# Altium footprint library TitansLib.PcbLib: 333 footprints (part 9 of 21)
Each footprint in its own frame and in the unit in brackets; x right, y up, seen from the top. Pads: shape width x height; smd on the part's side, far side on the other; paste and mask are expansions set on the pad; w line width, h text height; cw(c..) or ccw(c..) is an arc to the next point about the centre after c.
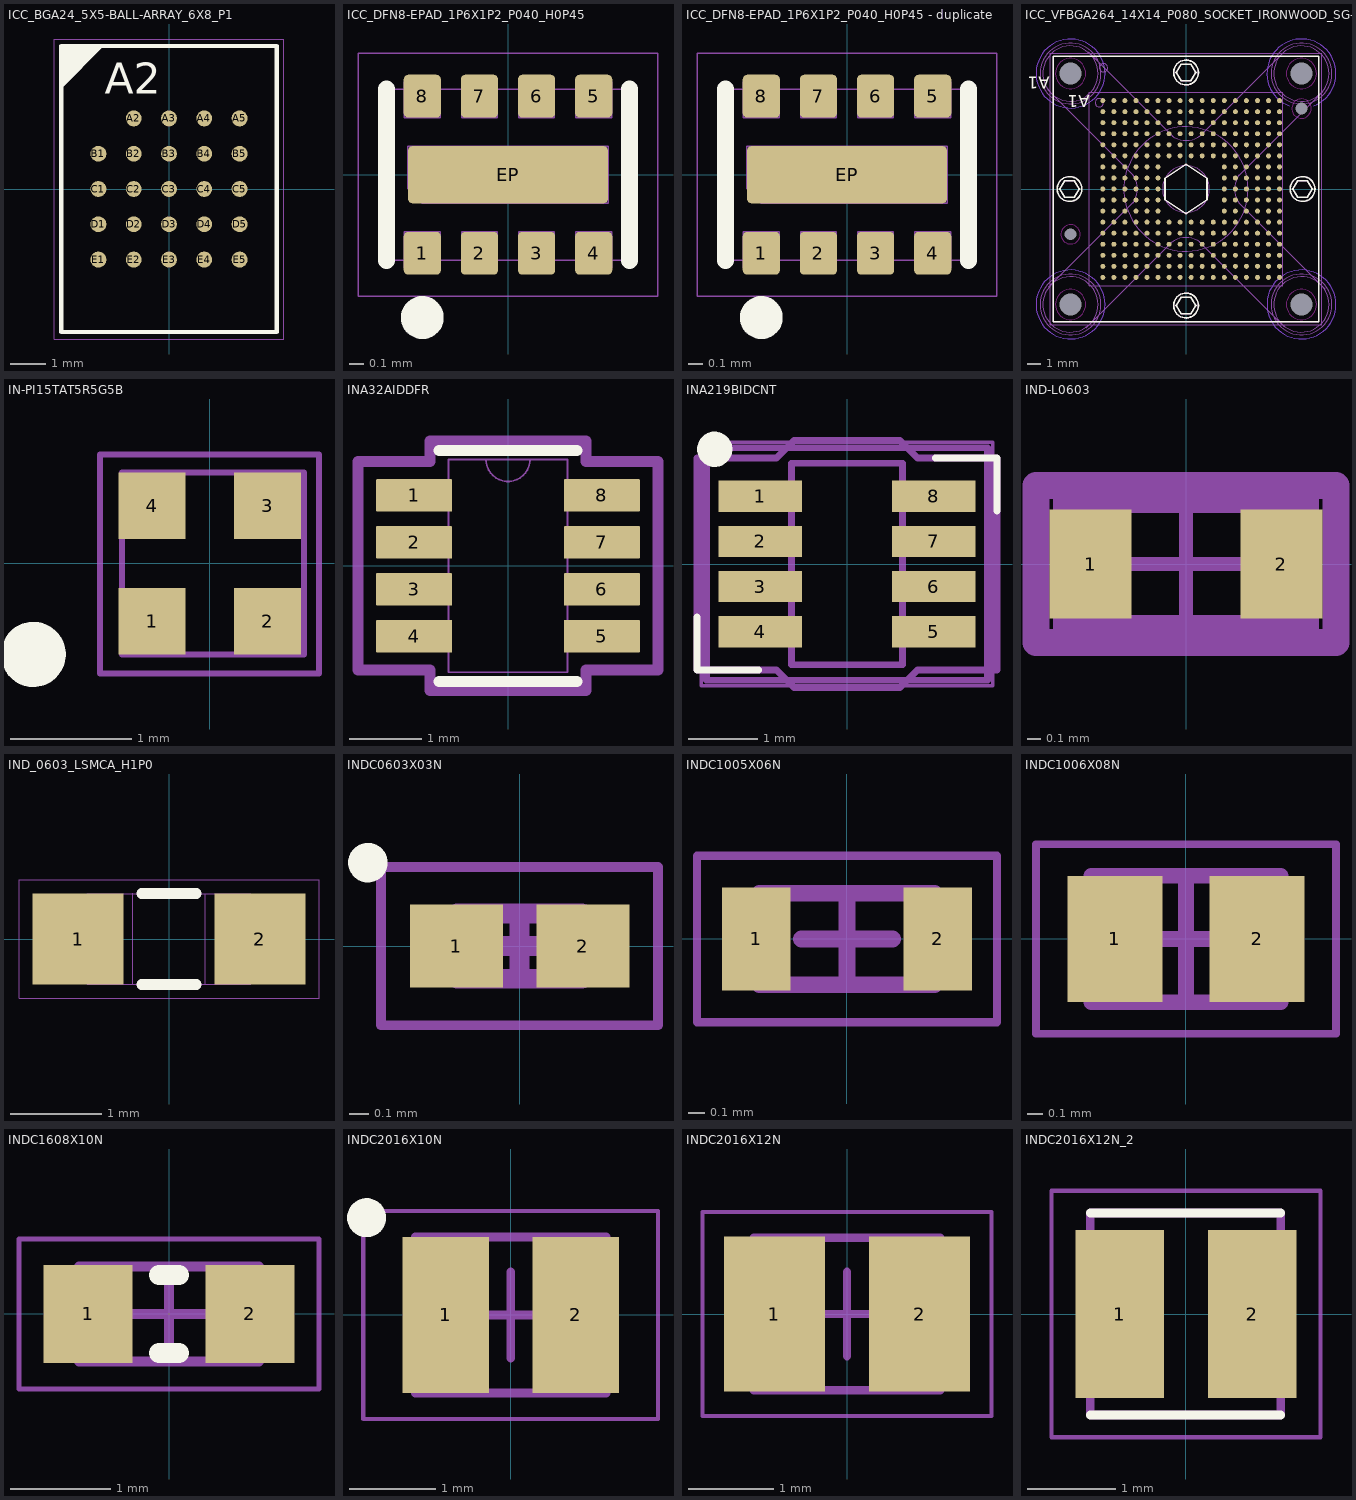
[diagram p8: the footprints below, top view; thin cyan lines are the x and y axes]

## ICC_BGA24_5X5-BALL-ARRAY_6X8_P1 [mm]
height 1.2
pads (24):
  round 0.45 smd mask+0.05: A2(-1,2) A3(0,2) A4(1,2) A5(2,2) B1(-2,1) B2(-1,1) B3(0,1) B4(1,1) B5(2,1) C1(-2,0) C2(-1,0) C3(0,0) C4(1,0) C5(2,0) D1(-2,-1) D2(-1,-1) D3(0,-1) D4(1,-1) D5(2,-1) E1(-2,-2) E2(-1,-2) E3(0,-2) E4(1,-2) E5(2,-2)
Top Overlay:
  lines w0.12: -3.05,2.925 -1.925,4.05 ; -3.05,3.025 -2.025,4.05 ; -3.05,3.175 -2.175,4.05 ; -3.05,3.325 -2.325,4.05 ; -3.05,3.475 -2.475,4.05 ; -3.05,3.625 -2.625,4.05 ; -3.05,3.775 -2.775,4.05 ; -3.05,3.9 -2.9,4.05 ; -3.05,-4.05 3.05,-4.05 3.05,4.05 -3.05,4.05 -3.05,-4.05
  text "A2" at -1.825,2.4 h1.5
Top 3D Body:
  lines w0.01: -3.25,-4.25 -3.25,4.25 3.25,4.25 3.25,-4.25 -3.25,-4.25
Top Assembly:
  text "E1" at -3.01,-2.201 h0.75
  text "D1" at -2.984,-1.235 h0.75
  text "C1" at -3.01,-0.194 h0.75
  text "B1" at -3.035,0.72 h0.75
  text "A5" at 1.74,2.575 h0.75
  text "A4" at 0.699,2.575 h0.75
  text "A3" at -0.317,2.6 h0.75
  text "A2" at -1.232,2.625 h0.75
Bottom 3D Body:
  lines w0.01: -3.05,2.925 -1.925,4.05 -3.037,2.937 ; -3.05,-4.05 -3.05,4.05 3.05,4.05 3.05,-4.05 -3.05,-4.05
3D body "ICC_BGA24_5X5-BALL-ARRAY_6X8_P1.STEP": height 0.96, standoff -0.04, extent -3,-4 3,4
3D body: height 1.2, standoff 0, extent -3.055,-4.055 3.055,4.055

## ICC_DFN8-EPAD_1P6X1P2_P040_H0P45 [mm] "MCD-02937"
height 0.5
pads (9):
  rrect23% 0.26x0.3 smd mask+0.038: 1(-0.6,-0.55) 2(-0.2,-0.55) 3(0.2,-0.55) 4(0.6,-0.55) 5(0.6,0.55) 6(0.2,0.55) 7(-0.2,0.55) 8(-0.6,0.55)
  rrect15% 1.4x0.4 smd mask+0.038: EP(0,0)
Top Overlay:
  circle w0.2: c-0.6,-1 r0.05
  lines w0.12: -0.85,-0.6 -0.85,0.6 ; 0.85,-0.6 0.85,0.6
Top Courtyard:
  lines w0.01: -1.05,-0.85 -1.05,0.85 1.05,0.85 1.05,-0.85 -1.05,-0.85
Bottom 3D Body:
  lines w0.01: -0.7,-0.1 -0.7,0.2 0.7,0.2 0.7,-0.2 -0.6,-0.2 -0.7,-0.1 ; -0.7,-0.1 -0.7,-0.1 ; -0.8,-0.6 0.8,-0.6 0.8,0.6 -0.8,0.6 -0.8,-0.6 ; -0.725,-0.65 -0.525,-0.65 -0.475,-0.65 -0.475,-0.4 -0.725,-0.4 -0.725,-0.65 ; -0.725,0.4 -0.475,0.4 -0.475,0.65 -0.675,0.65 -0.725,0.65 -0.725,0.4 ; -0.325,-0.65 -0.125,-0.65 -0.075,-0.65 -0.075,-0.4 -0.325,-0.4 -0.325,-0.65 ; -0.325,0.4 -0.075,0.4 -0.075,0.65 -0.275,0.65 -0.325,0.65 -0.325,0.4 ; 0.075,-0.65 0.275,-0.65 0.325,-0.65 0.325,-0.4 0.075,-0.4 0.075,-0.65 ; 0.075,0.4 0.325,0.4 0.325,0.65 0.125,0.65 0.075,0.65 0.075,0.4 ; 0.475,-0.65 0.675,-0.65 0.725,-0.65 0.725,-0.4 0.475,-0.4 0.475,-0.65 ; 0.475,0.4 0.725,0.4 0.725,0.65 0.525,0.65 0.475,0.65 0.475,0.4
  text "9" at -0.084,-0.121 h0.4
  text "8" at -0.684,0.329 h0.4
  text "5" at 0.515,0.329 h0.4
  text "1" at -0.647,-0.575 h0.4
  text "4" at 0.512,-0.575 h0.4
3D body: height 0.51, standoff 0.5, extent -0.7,-0.5 -0.5,-0.3
3D body: height 0.15, standoff 0, extent -0.725,0.6 -0.475,0.65
3D body: height 0.05, standoff 0, extent -0.725,0.4 -0.475,0.6
3D body: height 0.05, standoff 0, extent -0.7,-0.2 0.7,0.2
3D body: height 0.15, standoff 0, extent -0.325,0.6 -0.075,0.65
3D body: height 0.05, standoff 0, extent -0.325,0.4 -0.075,0.6
3D body: height 0.15, standoff 0, extent 0.075,0.6 0.325,0.65
3D body: height 0.05, standoff 0, extent 0.075,0.4 0.325,0.6
3D body: height 0.15, standoff 0, extent 0.475,0.6 0.725,0.65
3D body: height 0.05, standoff 0, extent 0.475,0.4 0.725,0.6
3D body: height 0.15, standoff 0, extent -0.725,-0.65 -0.475,-0.6
3D body: height 0.05, standoff 0, extent -0.725,-0.6 -0.475,-0.4
3D body: height 0.15, standoff 0, extent -0.325,-0.65 -0.075,-0.6
3D body: height 0.05, standoff 0, extent -0.325,-0.6 -0.075,-0.4
3D body: height 0.15, standoff 0, extent 0.075,-0.65 0.325,-0.6
3D body: height 0.05, standoff 0, extent 0.075,-0.6 0.325,-0.4
3D body: height 0.15, standoff 0, extent 0.475,-0.65 0.725,-0.6
3D body: height 0.05, standoff 0, extent 0.475,-0.6 0.725,-0.4
3D body: height 0.5, standoff 0.05, extent -0.8,-0.6 0.8,0.6

## ICC_DFN8-EPAD_1P6X1P2_P040_H0P45 - duplicate [mm] "MCD-02937"
height 0.5
pads (9):
  rrect23% 0.26x0.3 smd mask+0.038: 1(-0.6,-0.55) 2(-0.2,-0.55) 3(0.2,-0.55) 4(0.6,-0.55) 5(0.6,0.55) 6(0.2,0.55) 7(-0.2,0.55) 8(-0.6,0.55)
  rrect15% 1.4x0.4 smd mask+0.038: EP(0,0)
Top Overlay:
  circle w0.2: c-0.6,-1 r0.05
  lines w0.12: -0.85,-0.6 -0.85,0.6 ; 0.85,-0.6 0.85,0.6
Top Courtyard:
  lines w0.01: -1.05,-0.85 -1.05,0.85 1.05,0.85 1.05,-0.85 -1.05,-0.85
Bottom 3D Body:
  lines w0.01: -0.7,-0.1 -0.7,0.2 0.7,0.2 0.7,-0.2 -0.6,-0.2 -0.7,-0.1 ; -0.7,-0.1 -0.7,-0.1 ; -0.8,-0.6 0.8,-0.6 0.8,0.6 -0.8,0.6 -0.8,-0.6 ; -0.725,-0.65 -0.525,-0.65 -0.475,-0.65 -0.475,-0.4 -0.725,-0.4 -0.725,-0.65 ; -0.725,0.4 -0.475,0.4 -0.475,0.65 -0.675,0.65 -0.725,0.65 -0.725,0.4 ; -0.325,-0.65 -0.125,-0.65 -0.075,-0.65 -0.075,-0.4 -0.325,-0.4 -0.325,-0.65 ; -0.325,0.4 -0.075,0.4 -0.075,0.65 -0.275,0.65 -0.325,0.65 -0.325,0.4 ; 0.075,-0.65 0.275,-0.65 0.325,-0.65 0.325,-0.4 0.075,-0.4 0.075,-0.65 ; 0.075,0.4 0.325,0.4 0.325,0.65 0.125,0.65 0.075,0.65 0.075,0.4 ; 0.475,-0.65 0.675,-0.65 0.725,-0.65 0.725,-0.4 0.475,-0.4 0.475,-0.65 ; 0.475,0.4 0.725,0.4 0.725,0.65 0.525,0.65 0.475,0.65 0.475,0.4
  text "9" at -0.084,-0.121 h0.4
  text "8" at -0.684,0.329 h0.4
  text "5" at 0.515,0.329 h0.4
  text "1" at -0.647,-0.575 h0.4
  text "4" at 0.512,-0.575 h0.4
3D body: height 0.51, standoff 0.5, extent -0.7,-0.5 -0.5,-0.3
3D body: height 0.15, standoff 0, extent -0.725,0.6 -0.475,0.65
3D body: height 0.05, standoff 0, extent -0.725,0.4 -0.475,0.6
3D body: height 0.05, standoff 0, extent -0.7,-0.2 0.7,0.2
3D body: height 0.15, standoff 0, extent -0.325,0.6 -0.075,0.65
3D body: height 0.05, standoff 0, extent -0.325,0.4 -0.075,0.6
3D body: height 0.15, standoff 0, extent 0.075,0.6 0.325,0.65
3D body: height 0.05, standoff 0, extent 0.075,0.4 0.325,0.6
3D body: height 0.15, standoff 0, extent 0.475,0.6 0.725,0.65
3D body: height 0.05, standoff 0, extent 0.475,0.4 0.725,0.6
3D body: height 0.15, standoff 0, extent -0.725,-0.65 -0.475,-0.6
3D body: height 0.05, standoff 0, extent -0.725,-0.6 -0.475,-0.4
3D body: height 0.15, standoff 0, extent -0.325,-0.65 -0.075,-0.6
3D body: height 0.05, standoff 0, extent -0.325,-0.6 -0.075,-0.4
3D body: height 0.15, standoff 0, extent 0.075,-0.65 0.325,-0.6
3D body: height 0.05, standoff 0, extent 0.075,-0.6 0.325,-0.4
3D body: height 0.15, standoff 0, extent 0.475,-0.65 0.725,-0.6
3D body: height 0.05, standoff 0, extent 0.475,-0.6 0.725,-0.4
3D body: height 0.5, standoff 0.05, extent -0.8,-0.6 0.8,0.6

## ICC_VFBGA264_14X14_P080_SOCKET_IRONWOOD_SG-BGA-6112MF [mm] "MCD-03176"
height 8.25
pads (270):
  round 0.36 smd mask+0.05: A1(-6.025,6.4) A2(-5.225,6.4) A3(-4.425,6.4) A4(-3.625,6.4) A5(-2.825,6.4) A6(-2.025,6.4) A7(-1.225,6.4) A8(-0.425,6.4) A9(0.375,6.4) A10(1.175,6.4) A11(1.975,6.4) A12(2.775,6.4) A13(3.575,6.4) A14(4.375,6.4) A15(5.175,6.4) A16(5.975,6.4) A17(6.775,6.4) B1(-6.025,5.6) B2(-5.225,5.6) B3(-4.425,5.6) B4(-3.625,5.6) B5(-2.825,5.6) B6(-2.025,5.6) B7(-1.225,5.6) B8(-0.425,5.6) B9(0.375,5.6) B10(1.175,5.6) B11(1.975,5.6) B12(2.775,5.6) B13(3.575,5.6) B14(4.375,5.6) B15(5.175,5.6) B16(5.975,5.6) B17(6.775,5.6) C1(-6.025,4.8) C2(-5.225,4.8) C3(-4.425,4.8) C4(-3.625,4.8) C5(-2.825,4.8) C6(-2.025,4.8) C7(-1.225,4.8) C8(-0.425,4.8) C9(0.375,4.8) C10(1.175,4.8) C11(1.975,4.8) C12(2.775,4.8) C13(3.575,4.8) C14(4.375,4.8) C15(5.175,4.8) C16(5.975,4.8) C17(6.775,4.8) D1(-6.025,4) D2(-5.225,4) D3(-4.425,4) D4(-3.625,4) D5(-2.825,4) D6(-2.025,4) D7(-1.225,4) D8(-0.425,4) D9(0.375,4) D10(1.175,4) D11(1.975,4) D12(2.775,4) D13(3.575,4) D14(4.375,4) D15(5.175,4) D16(5.975,4) D17(6.775,4) E1(-6.025,3.2) E2(-5.225,3.2) E3(-4.425,3.2) E4(-3.625,3.2) E5(-2.825,3.2) E6(-2.025,3.2) E7(-1.225,3.2) E8(-0.425,3.2) E9(0.375,3.2) E10(1.175,3.2) E11(1.975,3.2) E12(2.775,3.2) E13(3.575,3.2) E14(4.375,3.2) E15(5.175,3.2) E16(5.975,3.2) E17(6.775,3.2) F1(-6.025,2.4) F2(-5.225,2.4) F3(-4.425,2.4) F4(-3.625,2.4) F5(-2.825,2.4) F6(-2.025,2.4) F7(-1.225,2.4) F8(-0.425,2.4) F9(0.375,2.4) F10(1.175,2.4) F11(1.975,2.4) F12(2.775,2.4) F13(3.575,2.4) F14(4.375,2.4) F15(5.175,2.4) F16(5.975,2.4) F17(6.775,2.4) G1(-6.025,1.6) G2(-5.225,1.6) G3(-4.425,1.6) G4(-3.625,1.6) G5(-2.825,1.6) G6(-2.025,1.6) G12(2.775,1.6) G13(3.575,1.6) G14(4.375,1.6) G15(5.175,1.6) G16(5.975,1.6) G17(6.775,1.6) H1(-6.025,0.8) H2(-5.225,0.8) H3(-4.425,0.8) H4(-3.625,0.8) H5(-2.825,0.8) H6(-2.025,0.8) H12(2.775,0.8) H13(3.575,0.8) H14(4.375,0.8) H15(5.175,0.8) H16(5.975,0.8) H17(6.775,0.8) J1(-6.025,0) J2(-5.225,0) J3(-4.425,0) J4(-3.625,0) J5(-2.825,0) J6(-2.025,0) J12(2.775,0) J13(3.575,0) J14(4.375,0) J15(5.175,0) J16(5.975,0) J17(6.775,0) K1(-6.025,-0.8) K2(-5.225,-0.8) K3(-4.425,-0.8) K4(-3.625,-0.8) K5(-2.825,-0.8) K6(-2.025,-0.8) K12(2.775,-0.8) K13(3.575,-0.8) K14(4.375,-0.8) K15(5.175,-0.8) K16(5.975,-0.8) K17(6.775,-0.8) L1(-6.025,-1.6) L2(-5.225,-1.6) L3(-4.425,-1.6) L4(-3.625,-1.6) L5(-2.825,-1.6) L6(-2.025,-1.6) L12(2.775,-1.6) L13(3.575,-1.6) L14(4.375,-1.6) L15(5.175,-1.6) L16(5.975,-1.6) L17(6.775,-1.6) M1(-6.025,-2.4) M2(-5.225,-2.4) M3(-4.425,-2.4) M4(-3.625,-2.4) M5(-2.825,-2.4) M6(-2.025,-2.4) M7(-1.225,-2.4) M8(-0.425,-2.4) M9(0.375,-2.4) M10(1.175,-2.4) M11(1.975,-2.4) M12(2.775,-2.4) M13(3.575,-2.4) M14(4.375,-2.4) M15(5.175,-2.4) M16(5.975,-2.4) M17(6.775,-2.4) N1(-6.025,-3.2) N2(-5.225,-3.2) N3(-4.425,-3.2) N4(-3.625,-3.2) N5(-2.825,-3.2) N6(-2.025,-3.2) N7(-1.225,-3.2) N8(-0.425,-3.2) N9(0.375,-3.2) N10(1.175,-3.2) N11(1.975,-3.2) N12(2.775,-3.2) N13(3.575,-3.2) N14(4.375,-3.2) N15(5.175,-3.2) N16(5.975,-3.2) N17(6.775,-3.2) P1(-6.025,-4) P2(-5.225,-4) P3(-4.425,-4) P4(-3.625,-4) P5(-2.825,-4) P6(-2.025,-4) P7(-1.225,-4) P8(-0.425,-4) P9(0.375,-4) P10(1.175,-4) P11(1.975,-4) P12(2.775,-4) P13(3.575,-4) P14(4.375,-4) P15(5.175,-4) P16(5.975,-4) P17(6.775,-4) R1(-6.025,-4.8) R2(-5.225,-4.8) R3(-4.425,-4.8) R4(-3.625,-4.8) R5(-2.825,-4.8) R6(-2.025,-4.8) R7(-1.225,-4.8) R8(-0.425,-4.8) R9(0.375,-4.8) R10(1.175,-4.8) R11(1.975,-4.8) R12(2.775,-4.8) R13(3.575,-4.8) R14(4.375,-4.8) R15(5.175,-4.8) R16(5.975,-4.8) R17(6.775,-4.8) T1(-6.025,-5.6) T2(-5.225,-5.6) T3(-4.425,-5.6) T4(-3.625,-5.6) T5(-2.825,-5.6) T6(-2.025,-5.6) T7(-1.225,-5.6) T8(-0.425,-5.6) T9(0.375,-5.6) T10(1.175,-5.6) T11(1.975,-5.6) T12(2.775,-5.6) T13(3.575,-5.6) T14(4.375,-5.6) T15(5.175,-5.6) T16(5.975,-5.6) T17(6.775,-5.6) U1(-6.025,-6.4) U2(-5.225,-6.4) U3(-4.425,-6.4) U4(-3.625,-6.4) U5(-2.825,-6.4) U6(-2.025,-6.4) U7(-1.225,-6.4) U8(-0.425,-6.4) U9(0.375,-6.4) U10(1.175,-6.4) U11(1.975,-6.4) U12(2.775,-6.4) U13(3.575,-6.4) U14(4.375,-6.4) U15(5.175,-6.4) U16(5.975,-6.4) u17(6.775,-6.4)
  round 0 hole 1.61 unplated mask+0.05: NPTH1(-8.363,8.363) NPTH2(8.363,8.363) NPTH3(8.363,-8.363) NPTH4(-8.363,-8.363)
  round 0 hole 0.85 unplated mask+0.05: NPTH5(-8.363,-3.283) NPTH6(8.363,5.823)
Bottom Layer keep-out:
  circle w0.01: c-8.362,8.362 r2.5
  circle w0.01: c8.363,-8.363 r2.5
  circle w0.01: c-8.363,-8.363 r2.5
  lines w0.01: 7.492,6.019 cw(c8.363,8.363) 9.254,6.027
Top Overlay:
  circle w0.12: c-8.438,0 r0.9
  circle w0.12: c0,-8.438 r0.9
  circle w0.12: c8.438,0 r0.9
  circle w0.12: c0,8.437 r0.9
  lines w0.12: -9.613,-9.613 9.613,-9.613 9.613,9.613 -9.613,9.613 -9.613,-9.613 ; -9.158,0 -8.798,0.6 -8.078,0.6 -7.718,0 -8.078,-0.6 -8.798,-0.6 -9.158,0 ; -1.524,-0.762 0,-1.778 1.524,-0.762 1.524,0.762 0,1.778 -1.524,0.762 -1.524,-0.762 ; -0.72,-8.438 -0.36,-7.838 0.36,-7.838 0.72,-8.438 0.36,-9.038 -0.36,-9.038 -0.72,-8.438 ; -0.72,8.437 -0.36,7.837 0.36,7.837 0.72,8.437 0.36,9.037 -0.36,9.037 -0.72,8.437 ; 7.718,0 8.078,0.6 8.798,0.6 9.158,0 8.798,-0.6 8.078,-0.6 7.718,0
  text "A1" at -6.974,7.061 h1.5
  text "A1" at -9.87,8.433 h1.5
Bottom Overlay:
  circle w0.12: c-8.363,8.363 r2.5
  circle w0.12: c-8.362,-8.362 r2.5
  circle w0.12: c8.362,-8.362 r2.5
  lines w0.12: 7.492,6.019 cw(c8.363,8.363) 9.254,6.027
Keep-Out Layer:
  circle w0.01: c8.363,5.823 r0.7
  circle w0.01: c-8.363,-3.283 r0.7
  circle w0.01: c-8.362,8.362 r1.1
  circle w0.01: c8.363,8.363 r1.1
  circle w0.01: c8.362,-8.362 r1.1
  circle w0.01: c-8.363,-8.363 r1.1
Bottom 3D Body:
  circle w0.01: c0,0 r4.5
  circle w0.01: c-8.438,0 r0.9
  circle w0.01: c0,-8.438 r0.9
  circle w0.01: c8.438,0 r0.9
  circle w0.01: c0,8.437 r0.9
  circle w0.01: c-5.975,8.775 r0.3
  circle w0.01: c-6.275,6.25 r0.3
  lines w0.01: -9.613,-9.613 9.613,-9.613 9.613,3.562 9.613,9.613 -9.613,9.613 -9.613,-9.613 ; -9.158,0 -8.798,-0.6 -8.078,-0.6 -7.718,0 -8.078,0.6 -8.798,0.6 -9.158,0 ; -7,-7 7,-7 7,7 -7,7 -7,-7 ; -1.524,-0.762 0,-1.778 1.524,-0.762 1.524,0.762 0,1.778 -1.524,0.762 -1.524,-0.762 ; -0.72,-8.438 -0.36,-9.038 0.36,-9.038 0.72,-8.438 0.36,-7.838 -0.36,-7.838 -0.72,-8.438 ; -0.72,8.437 -0.36,9.037 0.36,9.037 0.72,8.437 0.36,7.837 -0.36,7.837 -0.72,8.437 ; 7.718,0 8.078,-0.6 8.798,-0.6 9.158,0 8.798,0.6 8.078,0.6 7.718,0
  text "'.Designator'" at 10.257,2.256 h0.75
Mechanical 15:
  circle w0.01: c-8.362,8.362 r2
  circle w0.01: c-8.362,-8.362 r2
  circle w0.01: c8.363,-8.363 r2
  circle w0.01: c8.362,8.362 r2
  lines w0.01: -10.044,7.235 -3.82,1.011 ; -9.929,-7.075 -3.82,-0.967 ; -7.235,-10.044 -1.011,-3.82 ; -7.075,9.929 -0.967,3.82 ; -3.848,1.029 cw(c-5.325,0) -3.826,-0.996 ; -1.029,-3.848 cw(c0,-5.325) 0.996,-3.826 ; -0.996,3.826 ccw(c0,5.325) 1.029,3.848 ; 0.967,-3.82 7.075,-9.929 ; 1.011,3.82 7.235,10.044 ; 3.82,-1.011 10.044,-7.235 ; 3.82,0.967 9.928,7.075 ; 3.826,0.996 ccw(c5.325,0) 3.848,-1.029
Bottom Courtyard:
  lines w0.01: -9.825,-9.825 -9.825,9.825 9.825,9.825 9.825,-9.825 -9.825,-9.825
Mechanical 17:
  circle w0.01: c0,0 r1.7
  circle w0.01: c-8.362,8.362 r2.2
  circle w0.01: c8.362,8.362 r2.2
  circle w0.01: c8.362,-8.362 r2.2
  circle w0.01: c-8.362,-8.362 r2.2
3D body: height -1.6, standoff -6.6, extent -10.375,8.362 -6.362,10.375
3D body: height -1.6, standoff -6.6, extent -10.375,6.362 -6.363,8.375
3D body: height -1.6, standoff -6.6, extent 6.35,6.362 10.362,8.375
3D body: height -1.6, standoff -6.6, extent 6.35,8.362 10.363,10.375
3D body: height -1.6, standoff -6.6, extent 6.35,-10.363 10.362,-8.35
3D body: height -1.6, standoff -6.6, extent 6.35,-8.363 10.363,-6.35
3D body: height -1.6, standoff -6.6, extent -10.375,-10.363 -6.363,-8.35
3D body: height -1.6, standoff -6.6, extent -10.375,-8.363 -6.362,-6.35
3D body: height -1.6, standoff -6.6, extent -1.5,-1.5 1.5,1.5
3D body: height -4.1, standoff -6.6, extent -10.044,-10.044 10.044,10.044
3D body: height 6, standoff 5, extent -9.337,-0.9 -7.537,0.9
3D body: height 6.01, standoff 6, extent -9.158,-0.6 -7.718,0.6
3D body: height 6, standoff 5, extent -0.9,7.538 0.9,9.338
3D body: height 6.01, standoff 6, extent -0.72,7.837 0.72,9.037
3D body: height 6, standoff 5, extent 7.538,-0.9 9.338,0.9
3D body: height 6.01, standoff 6, extent 7.717,-0.6 9.158,0.6
3D body: height 6, standoff 5, extent -0.9,-9.338 0.9,-7.538
3D body: height 6.01, standoff 6, extent -0.72,-9.038 0.72,-7.838
3D body: height 9.85, standoff 1.6, extent -2.5,-2.5 2.5,2.5
3D body: height 9.86, standoff 9.85, extent -1.025,-1.212 1.025,1.213
3D body: height 5, standoff 0, extent -9.613,-9.613 9.613,9.613

## IN-PI15TAT5R5G5B [mm]
pads (4):
  rect 0.55x0.55 smd: 1(-0.475,-0.475) 2(0.475,-0.475) 3(0.475,0.475) 4(-0.475,0.475)
Top Overlay:
  circle w0.3: c-1.452,-0.748 r0.118
Top Courtyard:
  lines w0.05: -0.902,-0.904 0.898,-0.904 0.898,0.896 -0.902,0.896 -0.902,-0.904
Top Assembly:
  lines w0.05: -0.724,-0.75 0.776,-0.75 0.776,0.75 -0.724,0.75 -0.724,-0.75
  text ".Designator" at 0.254,0.762 h1.52
3D body "IN-PI15TAT5R5G5B.stp": height 0.85, standoff 0, extent -0.75,-0.75 0.75,0.75

## INA32AIDDFR [mm]
pads (8):
  rrect5% 1.05x0.45 smd paste+0 mask+0.05: 1(-1.3,0.975) 2(-1.3,0.325) 3(-1.3,-0.325) 4(-1.3,-0.975) 5(1.3,-0.975) 6(1.3,-0.325) 7(1.3,0.325) 8(1.3,0.975)
Top Overlay:
  lines w0.152: -0.953,-1.6 0.953,-1.6 ; -0.953,1.6 0.953,1.6
Top Designator:
  text ".Designator" at -3.492,-0.635 h1.27
Mechanical 13:
  lines w0.025: -0.305,1.473 ccw(c0,1.473) 0.305,1.473 ; -1.473,-1.165 -0.826,-1.165 -0.826,-0.784 -1.473,-0.784 -1.473,-1.165 ; -1.473,-0.515 -0.826,-0.515 -0.826,-0.134 -1.473,-0.134 -1.473,-0.515 ; -1.473,0.134 -0.826,0.134 -0.826,0.515 -1.473,0.515 -1.473,0.134 ; -1.473,0.784 -0.826,0.784 -0.826,1.165 -1.473,1.165 -1.473,0.784 ; -0.826,-1.473 -0.826,1.473 0.826,1.473 0.826,-1.473 -0.826,-1.473 ; 0.826,-1.165 1.473,-1.165 1.473,-0.784 0.826,-0.784 0.826,-1.165 ; 0.826,-0.515 1.473,-0.515 1.473,-0.134 0.826,-0.134 0.826,-0.515 ; 0.826,0.134 1.473,0.134 1.473,0.515 0.826,0.515 0.826,0.134 ; 0.826,0.784 1.473,0.784 1.473,1.165 0.826,1.165 0.826,0.784
Mechanical 15:
  lines w0.152: -2.077,-1.444 -1.079,-1.444 -1.079,-1.727 1.079,-1.727 1.079,-1.444 2.077,-1.444 2.077,1.444 1.079,1.444 1.079,1.727 -1.079,1.727 -1.079,1.444 -2.077,1.444 -2.077,-1.444
3D body "SOT_32AIDDFR_TEX.step": height 1.09, standoff 0, extent -1.473,-1.473 1.473,1.473

## INA219BIDCNT [mm]
pads (8):
  rect 1.2x0.45 smd: 1(-1.25,0.975) 2(-1.25,0.325) 3(-1.25,-0.325) 4(-1.25,-0.975) 5(1.25,-0.975) 6(1.25,-0.325) 7(1.25,0.325) 8(1.25,0.975)
Top Overlay:
  circle w0.254: c-1.905,1.651 r0.127
  lines w0.1: -2.159,-0.762 -2.159,-1.524 -1.27,-1.524 ; 1.27,1.524 2.159,1.524 2.159,0.762
Top Courtyard:
  lines w0.1: -2.159,-1.524 -2.159,1.143 -2.159,1.524 -1.016,1.524 -0.762,1.778 0.762,1.778 1.016,1.524 2.159,1.524 2.159,-1.143 2.159,-1.524 1.016,-1.524 0.762,-1.778 -0.762,-1.778 -1.016,-1.524 -2.159,-1.524
Top Assembly:
  lines w0.1: -2.023,-1.673 -2.023,1.673 2.023,1.673 2.023,-1.673 -2.023,-1.673
  text ".Designator" at -1.5,-0.112 h1
Mechanical 15:
  lines w0.1: -0.8,-1.45 0.8,-1.45 0.8,1.45 -0.8,1.45 -0.8,-1.45
Mechanical 20:
  lines w0.05: -2.1,-1.75 2.1,-1.75 2.1,1.75 -2.1,1.75 -2.1,-1.75

## IND-L0603 [mm]
pads (2):
  rect 0.6x0.8 smd paste+0 mask+0: 1(-0.7,0) 2(0.7,0)
Top 3D Body:
  lines w0.2: -0.875,-0.475 0.875,-0.475 0.875,0.475 -0.875,0.475 -0.875,-0.475
Top Courtyard:
  lines w0.2: -1.1,-0.575 1.1,-0.575 1.1,0.575 -1.1,0.575 -1.1,-0.575
Top Component Center:
  lines w0.1: -0.5,0 0.5,0 ; 0,-0.5 0,0.5
Top Assembly:
  lines w0.2: -1.1,-0.575 1.1,-0.575 1.1,0.575 -1.1,0.575 -1.1,-0.575
3D body "Ind_TDK_MLZ1608A1R0WT000_eec.STEP": height 0.25, standoff 0, extent -1.1,-0.575 1.1,0.575

## IND_0603_LSMCA_H1P0 [mm]
height 1
pads (2):
  rect 1x1 smd mask+0.05: 1(-1,0) 2(1,0)
Top Overlay:
  lines w0.12: -0.3,-0.5 0.3,-0.5 ; -0.3,0.5 0.3,0.5
Top Courtyard:
  lines w0.01: -1.65,-0.65 1.65,-0.65 1.65,0.65 -1.65,0.65 -1.65,-0.65
Bottom 3D Body:
  lines w0.01: -0.4,-0.497 -0.4,0.503 ; 0.4,-0.503 0.4,0.497 ; -0.9,-0.5 -0.9,0.5 0.9,0.5 0.9,-0.5 -0.9,-0.5
3D body: height 1, standoff 0, extent -0.4,-0.5 0.4,0.5
3D body: height 1, standoff 0, extent 0.4,-0.503 0.9,0.497
3D body: height 1, standoff 0, extent -0.9,-0.497 -0.4,0.503

## INDC0603X03N [mm] "Chip Inductor, 2-Leads, Body 0.60x0.30mm, IPC Medium Density"
height 0.33
pads (2):
  rect 0.47x0.42 smd: 1(-0.32,0) 2(0.32,0)
Top Overlay:
  circle w0.1: c-0.767,0.422 r0.05
Top Courtyard:
  lines w0.05: -0.7,-0.4 0.7,-0.4 0.7,0.4 -0.7,0.4 -0.7,-0.4
  lines w0.1: -0.165,0 0.165,0 ; 0,-0.165 0,0.165
Top Assembly:
  lines w0.1: -0.315,-0.165 0.315,-0.165 0.315,0.165 -0.315,0.165 -0.315,-0.165
3D body "INDC0603X03N.step": height 0.33, standoff 0, extent -0.315,-0.165 0.315,0.165

## INDC1005X06N [mm] "Chip Inductor, 2-Leads, Body 1.00x0.50mm, IPC Medium Density"
height 0.55
pads (2):
  rect 0.41x0.62 smd: 1(-0.545,0) 2(0.545,0)
Top Courtyard:
  lines w0.05: -0.9,-0.5 -0.9,0.5 0.9,0.5 0.9,-0.5 -0.9,-0.5
  lines w0.1: -0.275,0 0.275,0 ; 0,-0.275 0,0.275
Top Assembly:
  lines w0.1: -0.525,-0.275 -0.525,0.275 0.525,0.275 0.525,-0.275 -0.525,-0.275
3D body "INDC1005X06N.step": height 0.55, standoff 0, extent -0.525,-0.275 0.525,0.275

## INDC1006X08N [mm] "Chip Inductor, 2-Leads, Body 1.00x0.60mm, IPC Medium Density"
height 0.8
pads (2):
  rect 0.6x0.8 smd mask+0.05: 1(-0.45,0) 2(0.45,0)
Top Courtyard:
  lines w0.05: -0.95,-0.6 -0.95,0.6 0.95,0.6 0.95,-0.6 -0.95,-0.6
  lines w0.1: -0.4,0 0.4,0 ; 0,-0.4 0,0.4
Top Assembly:
  lines w0.1: -0.6,-0.4 -0.6,0.4 0.6,0.4 0.6,-0.4 -0.6,-0.4
3D body "INDC1006X08N.step": height 0.8, standoff 0, extent -0.6,-0.4 0.6,0.4

## INDC1608X10N [mm] "Chip Inductor, 2-Leads, Body 1.60x0.80mm, IPC Medium Density"
height 1
pads (2):
  rect 0.89x0.98 smd mask+0.05: 1(-0.81,0) 2(0.81,0)
Top Overlay:
  lines w0.2: -0.1,-0.39 0.1,-0.39 ; -0.1,0.39 0.1,0.39
Top Courtyard:
  lines w0.05: -1.5,-0.75 -1.5,0.75 1.5,0.75 1.5,-0.75 -1.5,-0.75
  lines w0.1: -0.475,0 0.475,0 ; 0,-0.475 0,0.475
Top Assembly:
  lines w0.1: -0.9,-0.475 -0.9,0.475 0.9,0.475 0.9,-0.475 -0.9,-0.475
3D body "INDC1608X10N.step": height 1, standoff 0, extent -0.9,-0.475 0.9,0.475

## INDC2016X10N [mm] "Chip Inductor, 2-Leads, Body 2.00x1.60mm, IPC Medium Density"
height 1
pads (2):
  rect 1x1.8 smd mask+0.075: 1(-0.75,0) 2(0.75,0)
Top Overlay:
  circle w0.25: c-1.662,1.122 r0.1
Top Courtyard:
  lines w0.05: -1.7,-1.2 -1.7,1.2 1.7,1.2 1.7,-1.2 -1.7,-1.2
  lines w0.1: -0.5,0 0.5,0 ; 0,-0.5 0,0.5
Top Assembly:
  lines w0.1: -1.1,-0.9 -1.1,0.9 1.1,0.9 1.1,-0.9 -1.1,-0.9
  text ".Designator" at -1.005,-0.318 h1
3D body "STP_WE-PMFI_201610 (rev1).stp": height 1.01, standoff 0.01, extent -1,-0.8 1,0.8

## INDC2016X12N [mm] "Chip Inductor, 2-Leads, Body 2.00x1.60mm, IPC Medium Density"
height 1.2
pads (2):
  rect 1.19x1.82 smd: 1(-0.855,0) 2(0.855,0)
Top Courtyard:
  lines w0.05: -1.7,-1.2 -1.7,1.2 1.7,1.2 1.7,-1.2 -1.7,-1.2
  lines w0.1: -0.5,0 0.5,0 ; 0,-0.5 0,0.5
Top Assembly:
  lines w0.1: -1.1,-0.9 -1.1,0.9 1.1,0.9 1.1,-0.9 -1.1,-0.9
3D body "INDC2016X12N.step": height 1.2, standoff 0, extent -1.1,-0.9 1.1,0.9

## INDC2016X12N_2 [mm]
pads (2):
  rect 1x1.9 smd: 1(-0.75,0) 2(0.75,0)
Top Overlay:
  lines w0.1: -1.086,-1.143 1.073,-1.143 ; -1.086,1.143 1.073,1.143
Top Courtyard:
  lines w0.05: -1.524,-1.397 1.524,-1.397 1.524,1.397 -1.524,1.397 -1.524,-1.397
Mechanical 15:
  lines w0.1: -1.086,-1.143 1.073,-1.143 1.073,1.143 -1.086,1.143 -1.086,-1.143
3D body "DFE201610E-R33M=P2.STEP": height 1, standoff 0, extent -1,-0.8 1,0.8